# Altium footprint library PcbLib1.PcbLib: 335 footprints (part 13 of 22)
Each footprint in its own frame and in the unit in brackets; x right, y up, seen from the top. Pads: shape width x height; smd on the part's side, far side on the other; paste and mask are expansions set on the pad; w line width, h text height; cw(c..) or ccw(c..) is an arc to the next point about the centre after c.
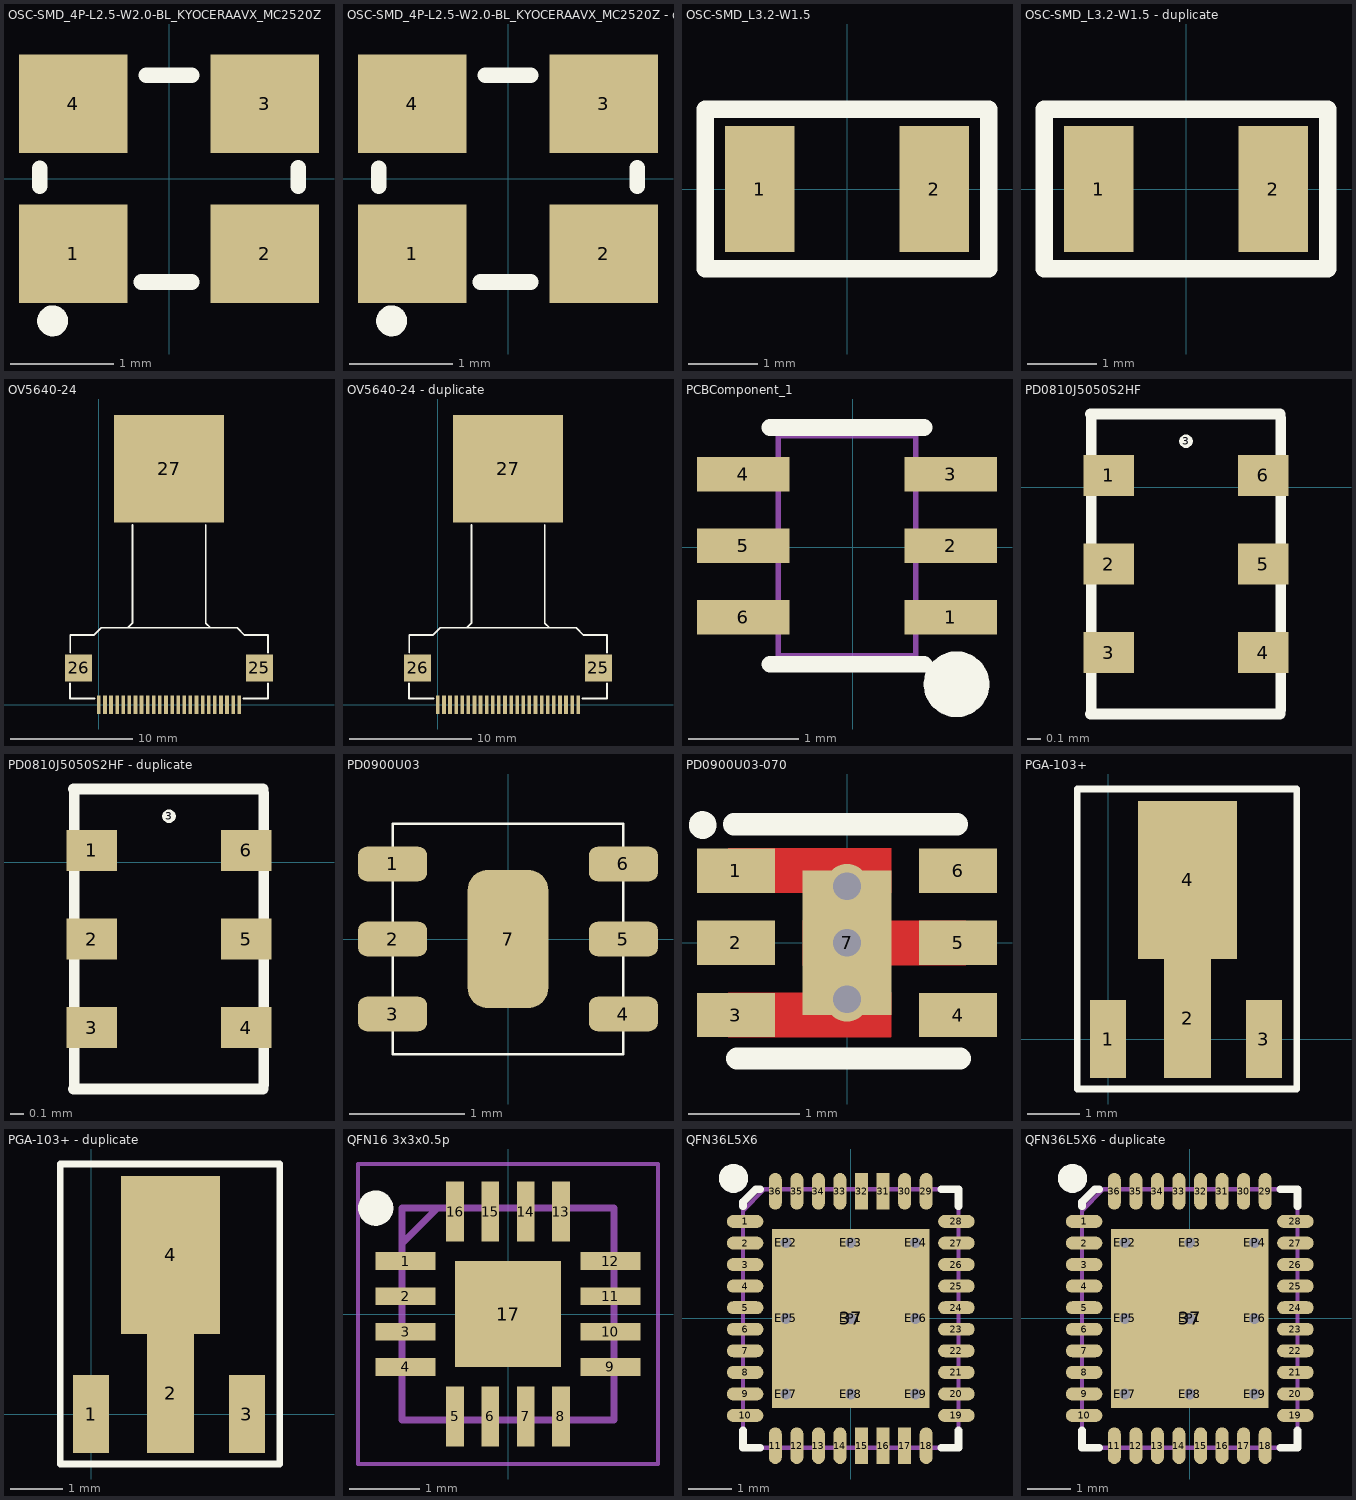
[diagram p12: the footprints below, top view; thin cyan lines are the x and y axes]

## OSC-SMD_4P-L2.5-W2.0-BL_KYOCERAAVX_MC2520Z [mm]
pads (4):
  rect 1.05x0.95 smd mask+0.05: 1(-0.925,-0.725) 2(0.925,-0.725) 3(0.925,0.725) 4(-0.925,0.725)
Top Overlay:
  circle w0.15: c-1.125,-1.375 r0.075
  lines w0.152: -1.25,-0.07 -1.25,0.101 ; -1.25,0.064 -1.25,0.07 ; -0.265,-1 0.22,-1 ; -0.22,-1 -0.03,-1 ; -0.22,1 -0.058,1 ; -0.192,1 0.22,1 ; 1.25,-0.07 1.25,0.105

## OSC-SMD_4P-L2.5-W2.0-BL_KYOCERAAVX_MC2520Z - duplicate [mm]
pads (4):
  rect 1.05x0.95 smd mask+0.05: 1(-0.925,-0.725) 2(0.925,-0.725) 3(0.925,0.725) 4(-0.925,0.725)
Top Overlay:
  circle w0.15: c-1.125,-1.375 r0.075
  lines w0.152: -1.25,-0.07 -1.25,0.101 ; -1.25,0.064 -1.25,0.07 ; -0.265,-1 0.22,-1 ; -0.22,-1 -0.03,-1 ; -0.22,1 -0.058,1 ; -0.192,1 0.22,1 ; 1.25,-0.07 1.25,0.105

## OSC-SMD_L3.2-W1.5 [mm]
pads (2):
  rect 1x1.8 smd: 1(-1.25,0) 2(1.25,0)
Top Overlay:
  lines w0.254: -2.032,-1.143 -2.032,1.143 2.032,1.143 2.032,-1.143 -2.032,-1.143

## OSC-SMD_L3.2-W1.5 - duplicate [mm]
pads (2):
  rect 1x1.8 smd: 1(-1.25,0) 2(1.25,0)
Top Overlay:
  lines w0.254: -2.032,-1.143 -2.032,1.143 2.032,1.143 2.032,-1.143 -2.032,-1.143

## OV5640-24 [mm]
pads (27):
  rect 0.3x1.5 smd: 1(0,0) 2(0.5,0) 3(1,0) 4(1.5,0) 5(2,0) 6(2.5,0) 7(3,0) 8(3.5,0) 9(4,0) 10(4.5,0) 11(5,0) 12(5.5,0) 13(6,0) 14(6.5,0) 15(7,0) 16(7.5,0) 17(8,0) 18(8.5,0) 19(9,0) 20(9.5,0) 21(10,0) 22(10.5,0) 23(11,0) 24(11.5,0)
  rect 2.2x2.2 smd: 25(13.151,3.023) 26(-1.657,3.023)
  rect 9x8.8 smd: 27(5.753,19.317)
Top Overlay:
  lines w0.152: -2.356,1.753 -2.356,0.508 -0.336,0.508 ; -2.343,4.293 -2.343,5.708 ; -2.325,5.708 -0.432,5.708 -0.413,5.708 0.187,6.308 ; 0.33,6.308 0.187,6.308 ; 2.159,6.308 2.371,6.308 2.753,6.69 2.753,14.732 ; 8.753,14.732 8.753,13.424 8.753,6.724 8.753,6.699 9.144,6.308 ; 9.186,6.308 9.271,6.308 ; 11.83,0.508 13.85,0.508 13.85,1.753 ; 13.85,4.293 13.85,5.708 ; 13.85,5.715 13.843,5.708 11.93,5.708 11.33,6.308 0.187,6.308

## OV5640-24 - duplicate [mm]
pads (27):
  rect 0.3x1.5 smd: 1(0,0) 2(0.5,0) 3(1,0) 4(1.5,0) 5(2,0) 6(2.5,0) 7(3,0) 8(3.5,0) 9(4,0) 10(4.5,0) 11(5,0) 12(5.5,0) 13(6,0) 14(6.5,0) 15(7,0) 16(7.5,0) 17(8,0) 18(8.5,0) 19(9,0) 20(9.5,0) 21(10,0) 22(10.5,0) 23(11,0) 24(11.5,0)
  rect 2.2x2.2 smd: 25(13.151,3.023) 26(-1.657,3.023)
  rect 9x8.8 smd: 27(5.753,19.317)
Top Overlay:
  lines w0.152: -2.356,1.753 -2.356,0.508 -0.336,0.508 ; -2.343,4.293 -2.343,5.708 ; -2.325,5.708 -0.432,5.708 -0.413,5.708 0.187,6.308 ; 0.33,6.308 0.187,6.308 ; 2.159,6.308 2.371,6.308 2.753,6.69 2.753,14.732 ; 8.753,14.732 8.753,13.424 8.753,6.724 8.753,6.699 9.144,6.308 ; 9.186,6.308 9.271,6.308 ; 11.83,0.508 13.85,0.508 13.85,1.753 ; 13.85,4.293 13.85,5.708 ; 13.85,5.715 13.843,5.708 11.93,5.708 11.33,6.308 0.187,6.308

## PCBComponent_1 [mm] "SGM3157"
pads (6):
  rect 0.841x0.315 smd: 1(0.893,-0.64) 2(0.893,0.01) 3(0.893,0.661) 4(-0.997,0.661) 5(-0.997,0.01) 6(-0.997,-0.64)
Top Overlay:
  lines w0.152: -0.753,-1.066 0.649,-1.066 ; -0.753,1.087 0.649,1.087
  lines w0.3: 0.796,-1.249 0.804,-1.199 0.829,-1.153 0.87,-1.12 0.918,-1.102 0.972,-1.102 1.02,-1.12 1.061,-1.153 1.086,-1.199 1.096,-1.249 1.086,-1.3 1.061,-1.346 1.02,-1.379 0.972,-1.397 0.918,-1.397 0.87,-1.379 0.829,-1.346 0.804,-1.3 0.796,-1.249
Mechanical 6:
  lines w0.051: -0.677,-0.99 0.573,-0.99 0.573,1.011 -0.677,1.011 -0.677,-0.99
Mechanical 7:
  region: -0.753,-0.752 -0.753,-0.528 -0.667,-0.528 -0.667,-0.752
  region: -0.753,-0.101 -0.753,0.122 -0.667,0.122 -0.667,-0.101
  region: -0.753,0.549 -0.753,0.772 -0.667,0.772 -0.667,0.549
  region: 0.563,0.549 0.563,0.772 0.647,0.772 0.647,0.549
  region: 0.563,-0.101 0.563,0.122 0.647,0.122 0.647,-0.101
  region: 0.563,-0.752 0.563,-0.528 0.647,-0.528 0.647,-0.752
Mechanical 9:
  region: -0.743,-0.752 -0.743,-0.528 -1.103,-0.528 -1.103,-0.752
  region: -0.743,-0.101 -0.743,0.122 -1.103,0.122 -1.103,-0.101
  region: -0.743,0.549 -0.743,0.772 -1.103,0.772 -1.103,0.549
  region: 0.636,0.549 0.636,0.772 0.997,0.772 0.997,0.549
  region: 0.636,-0.101 0.636,0.122 0.997,0.122 0.997,-0.101
  region: 0.636,-0.752 0.636,-0.528 0.997,-0.528 0.997,-0.752

## PD0810J5050S2HF [mm] "coupler"
pads (7):
  rect 0.37x0.3 smd: 1(1.819,0.086) 2(1.819,-0.564) 3(1.819,-1.214) 4(2.949,-1.214) 5(2.949,-0.564) 6(2.949,0.086)
  round 0.1 on Top Overlay: 3(2.384,0.336)
Top Overlay:
  lines w0.08: 1.684,-1.664 3.074,-1.664 ; 1.684,0.536 3.074,0.536 ; 1.689,-1.634 1.689,0.506 ; 3.079,-1.634 3.079,0.506

## PD0810J5050S2HF - duplicate [mm]
pads (7):
  rect 0.37x0.3 smd: 1(1.819,0.086) 2(1.819,-0.564) 3(1.819,-1.214) 4(2.949,-1.214) 5(2.949,-0.564) 6(2.949,0.086)
  round 0.1 on Top Overlay: 3(2.384,0.336)
Top Overlay:
  lines w0.08: 1.684,-1.664 3.074,-1.664 ; 1.684,0.536 3.074,0.536 ; 1.689,-1.634 1.689,0.506 ; 3.079,-1.634 3.079,0.506

## PD0900U03 [mm]
pads (7):
  rrect50% 0.6x0.3 smd: 1(-1,0.65) 2(-1,0) 3(-1,-0.65) 4(1,-0.65) 5(1,0) 6(1,0.65)
  rrect50% 0.7x1.2 smd: 7(0,0)
Top Overlay:
  lines w0.02: -1,-1 -1,1 1,1 1,-1 -1,-1

## PD0900U03-070 [mm]
pads (7):
  rect 0.7x0.4 smd mask+0: 1(-1,0.65) 2(-1,0) 3(-1,-0.65) 4(1,-0.65) 5(1,0) 6(1,0.65)
  rect 0.8x1.3 smd mask+0: 7(0,0)
via 0,0.508 diameter 0.4 hole 0.25
via 0,-0.508 diameter 0.4 hole 0.25
via 0,0 diameter 0.4 hole 0.25
Top Layer:
  region: 0.399,0.852 0.399,0.45 -1.067,0.45 -1.067,0.851
  region: 0.399,-0.448 0.399,-0.85 -1.067,-0.85 -1.067,-0.449
  region: -0.399,-0.202 -0.399,0.2 1.067,0.2 1.067,-0.201
Top Overlay:
  circle w0.15: c-1.299,1.06 r0.05
  lines w0.2: -1.016,1.067 0.991,1.067 ; -0.991,-1.041 1.016,-1.041

## PGA-103+ [mm]
pads (4):
  rect 0.7x1.5 smd: 1(0,0) 3(3,0)
  rect 0.9x2.3 smd: 2(1.53,0.4)
  rect 1.9x3.04 smd: 4(1.53,3.06)
Top Overlay:
  lines w0.127: -0.59,-0.96 3.63,-0.96 3.63,4.81 -0.59,4.81 -0.59,-0.96

## PGA-103+ - duplicate [mm]
pads (4):
  rect 0.7x1.5 smd: 1(0,0) 3(3,0)
  rect 0.9x2.3 smd: 2(1.53,0.4)
  rect 1.9x3.04 smd: 4(1.53,3.06)
Top Overlay:
  lines w0.127: -0.59,-0.96 -0.59,4.81 3.63,4.81 3.63,-0.96 -0.59,-0.96

## QFN16 3x3x0.5p [mm]
height 1.27
pads (17):
  rect 0.85x0.25 smd: 1(-1.45,0.75) 2(-1.45,0.25) 3(-1.45,-0.25) 4(-1.45,-0.75) 9(1.45,-0.75) 10(1.45,-0.25) 11(1.45,0.25) 12(1.45,0.75)
  rect 0.25x0.85 smd: 5(-0.75,-1.45) 6(-0.25,-1.45) 7(0.25,-1.45) 8(0.75,-1.45) 13(0.75,1.45) 14(0.25,1.45) 15(-0.25,1.45) 16(-0.75,1.45)
  rect 1.5x1.5 smd: 17(0,0)
Top Overlay:
  circle w0.25: c-1.875,1.5 r0.125
Mechanical 13:
  lines w0.1: -1.5,1 -1,1.5 ; -1.5,-1.5 -1.5,1.5 1.5,1.5 1.5,-1.5 -1.5,-1.5
Mechanical 15:
  lines w0.05: -2.125,-2.125 -2.125,2.125 2.125,2.125 2.125,-2.125 -2.125,-2.125
3D body "RF5110GTR7.stp": height 0.9, standoff 0, extent -1.55,-1.55 1.55,1.55

## QFN36L5X6 [mm]
pads (46):
  oval 0.85x0.3 smd paste-0.025 mask+0.025: 1(-2.45,2.25) 2(-2.45,1.75) 3(-2.45,1.25) 4(-2.45,0.75) 5(-2.45,0.25) 6(-2.45,-0.25) 7(-2.45,-0.75) 8(-2.45,-1.25) 9(-2.45,-1.75) 10(-2.45,-2.25) 19(2.45,-2.25) 20(2.45,-1.75) 21(2.45,-1.25) 22(2.45,-0.75) 23(2.45,-0.25) 24(2.45,0.25) 25(2.45,0.75) 26(2.45,1.25) 27(2.45,1.75) 28(2.45,2.25)
  oval 0.3x0.85 smd paste-0.025 mask+0.025: 11(-1.75,-2.95) 12(-1.25,-2.95) 13(-0.75,-2.95) 14(-0.25,-2.95) 18(1.75,-2.95) 29(1.75,2.95) 30(1.25,2.95) 33(-0.25,2.95) 34(-0.75,2.95) 35(-1.25,2.95) 36(-1.75,2.95)
  rect 0.3x0.85 smd paste-0.025 mask+0.025: 15(0.25,-2.95) 16(0.75,-2.95) 17(1.25,-2.95) 31(0.75,2.95) 32(0.25,2.95)
  rect 3.65x4.15 smd mask+0.025: 37(0,0)
  rect 0.635x0.635 / inner round 0.635 / far side round 0.635 hole 0.254 mask-0.318: EP1(0,0) EP3(0,1.756) EP4(1.506,1.756) EP5(-1.506,0) EP6(1.506,0) EP7(-1.506,-1.756) EP8(0,-1.756) EP9(1.506,-1.756)
  rect 0.635x0.635 hole 0.254 mask-0.318: EP2(-1.506,1.756)
Top Overlay:
  region: -2.387,3.317 -2.437,3.439 -2.53,3.532 -2.652,3.582 -2.784,3.582 -2.905,3.532 -2.999,3.439 -3.049,3.317 -3.049,3.185 -2.999,3.064 -2.905,2.97 -2.784,2.92 -2.718,2.92 -2.652,2.92 -2.53,2.97 -2.437,3.064 -2.387,3.185
  lines w0.178: -2.5,-2.6 -2.5,-3 -2.1,-3 ; -2.5,2.6 -2.5,2.7 -2.2,3 -2.1,3 ; 2.1,-3 2.5,-3 2.5,-2.6 ; 2.1,3 2.5,3 2.5,2.6
Top Paste:
  region: 0.1,-0.105 1.4,-0.105 1.4,-1.655 0.1,-1.655
  region: -1.4,-0.1 -0.1,-0.1 -0.1,-1.65 -1.4,-1.65
  region: 0.11,1.64 1.41,1.64 1.41,0.09 0.11,0.09
  region: -1.4,1.65 -0.1,1.65 -0.1,0.1 -1.4,0.1
Bottom Solder:
  region: -1.84,2.07 1.83,2.07 1.83,-2.1 -1.84,-2.1
Mechanical 1:
  lines w0.1: -2.5,-3 2.5,-3 2.5,3 -2,3 -2.5,2.5 -2.5,-3
  text "U2" at -0.587,-0.394 h0.5

## QFN36L5X6 - duplicate [mm]
pads (46):
  oval 0.85x0.3 smd paste-0.025 mask+0.025: 1(-2.45,2.25) 2(-2.45,1.75) 3(-2.45,1.25) 4(-2.45,0.75) 5(-2.45,0.25) 6(-2.45,-0.25) 7(-2.45,-0.75) 8(-2.45,-1.25) 9(-2.45,-1.75) 10(-2.45,-2.25) 19(2.45,-2.25) 20(2.45,-1.75) 21(2.45,-1.25) 22(2.45,-0.75) 23(2.45,-0.25) 24(2.45,0.25) 25(2.45,0.75) 26(2.45,1.25) 27(2.45,1.75) 28(2.45,2.25)
  oval 0.3x0.85 smd paste-0.025 mask+0.025: 11(-1.75,-2.95) 12(-1.25,-2.95) 13(-0.75,-2.95) 14(-0.25,-2.95) 15(0.25,-2.95) 16(0.75,-2.95) 17(1.25,-2.95) 18(1.75,-2.95) 29(1.75,2.95) 30(1.25,2.95) 31(0.75,2.95) 32(0.25,2.95) 33(-0.25,2.95) 34(-0.75,2.95) 35(-1.25,2.95) 36(-1.75,2.95)
  rect 3.65x4.15 smd mask+0.025: 37(0,0)
  rect 0.635x0.635 / inner round 0.635 / far side round 0.635 hole 0.254 mask-0.318: EP1(0,0) EP3(0,1.756) EP4(1.506,1.756) EP5(-1.506,0) EP6(1.506,0) EP7(-1.506,-1.756) EP8(0,-1.756) EP9(1.506,-1.756)
  rect 0.635x0.635 hole 0.254 mask-0.318: EP2(-1.506,1.756)
Top Overlay:
  region: -2.387,3.317 -2.437,3.439 -2.53,3.532 -2.652,3.582 -2.784,3.582 -2.905,3.532 -2.999,3.439 -3.049,3.317 -3.049,3.185 -2.999,3.064 -2.905,2.97 -2.784,2.92 -2.718,2.92 -2.652,2.92 -2.53,2.97 -2.437,3.064 -2.387,3.185
  lines w0.178: -2.5,-2.6 -2.5,-3 -2.1,-3 ; -2.5,2.6 -2.5,2.7 -2.2,3 -2.1,3 ; 2.1,-3 2.5,-3 2.5,-2.6 ; 2.1,3 2.5,3 2.5,2.6
Top Paste:
  region: 0.1,-0.105 1.4,-0.105 1.4,-1.655 0.1,-1.655
  region: -1.4,-0.1 -0.1,-0.1 -0.1,-1.65 -1.4,-1.65
  region: 0.11,1.64 1.41,1.64 1.41,0.09 0.11,0.09
  region: -1.4,1.65 -0.1,1.65 -0.1,0.1 -1.4,0.1
Bottom Solder:
  region: -1.84,2.07 1.83,2.07 1.83,-2.1 -1.84,-2.1
Mechanical 1:
  lines w0.1: -2.5,-3 2.5,-3 2.5,3 -2,3 -2.5,2.5 -2.5,-3
  text "U2" at -0.587,-0.394 h0.5